# Altium footprint library IoT_SYNTHPATCH.PcbLib: 65 footprints (part 1 of 5)
Each footprint in its own frame and in the unit in brackets; x right, y up, seen from the top. Pads: shape width x height; smd on the part's side, far side on the other; paste and mask are expansions set on the pad; w line width, h text height; cw(c..) or ccw(c..) is an arc to the next point about the centre after c.
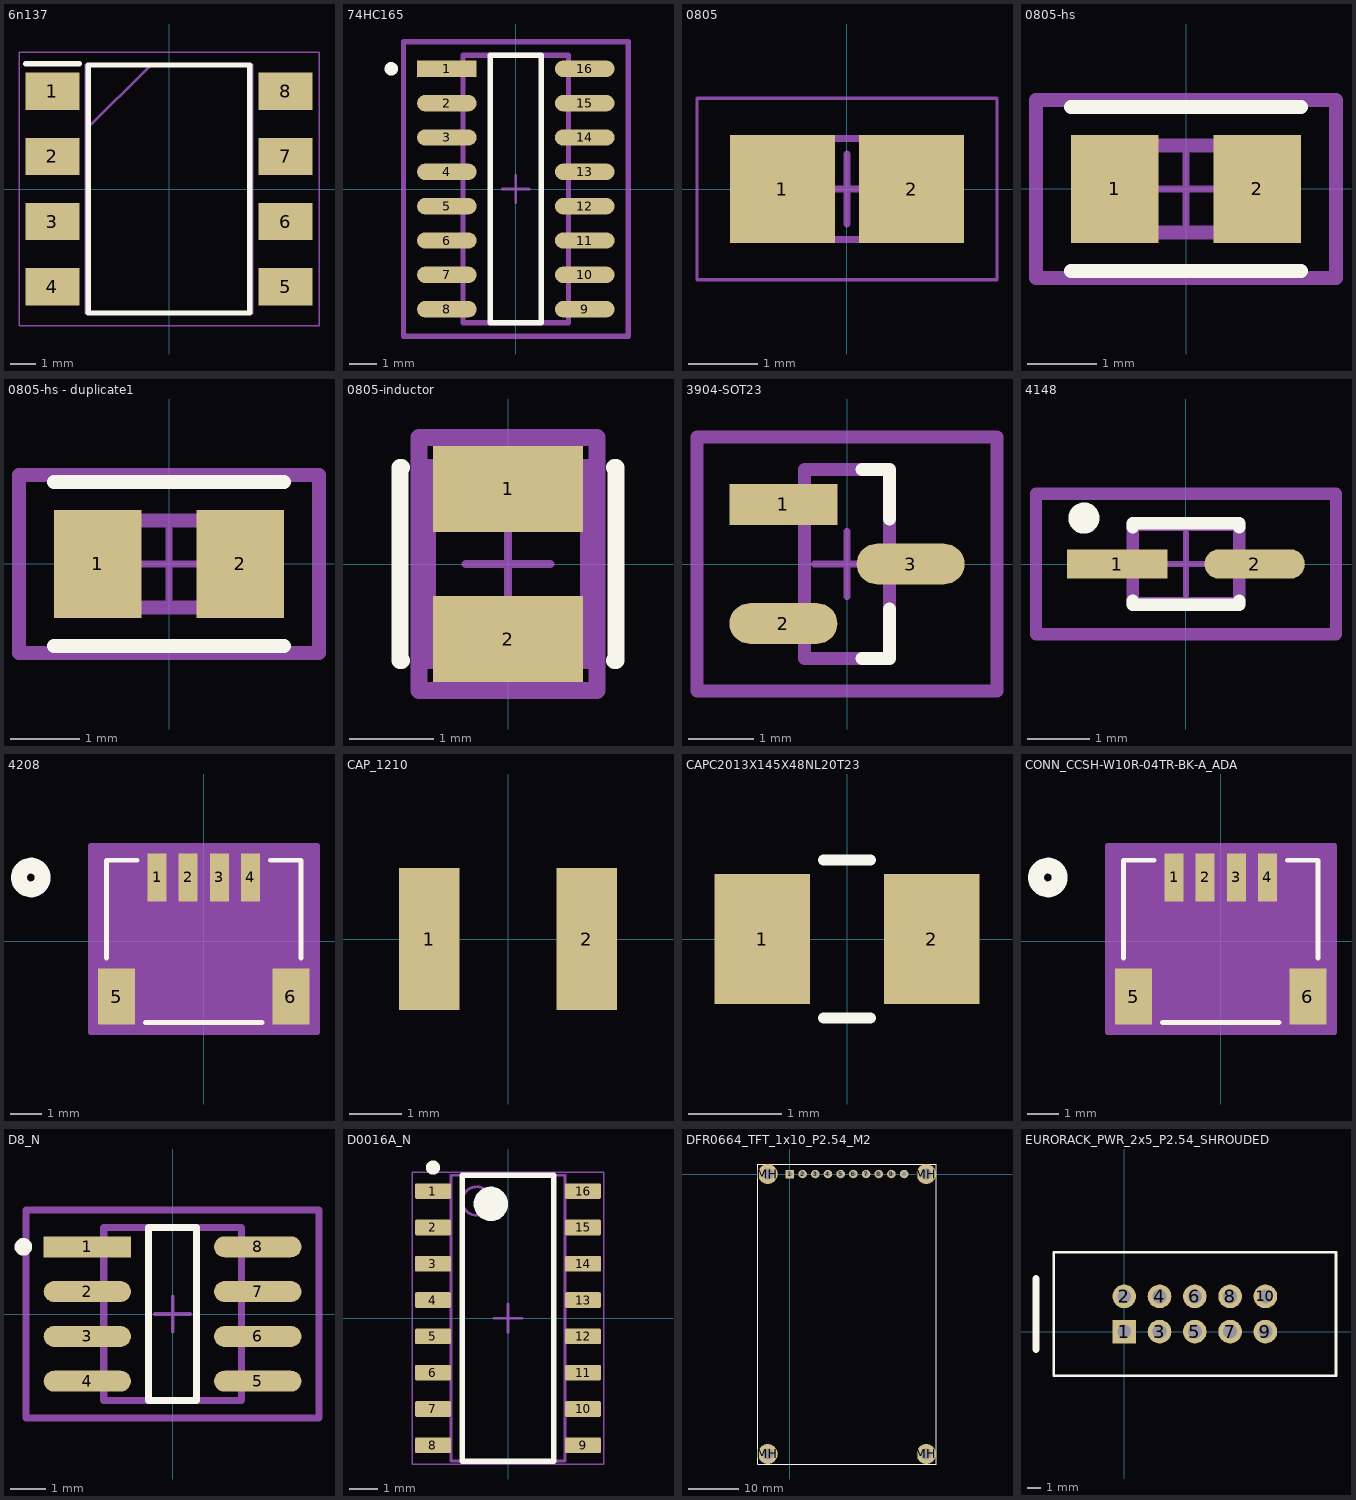
[diagram p0: the footprints below, top view; thin cyan lines are the x and y axes]

## 6n137 [mm]
pads (8):
  rect 2.1x1.45 smd: 1(-4.55,3.81) 2(-4.55,1.27) 3(-4.55,-1.27) 4(-4.55,-3.81) 5(4.55,-3.81) 6(4.55,-1.27) 7(4.55,1.27) 8(4.55,3.81)
Top Overlay:
  lines w0.2: -5.6,4.885 -3.5,4.885 ; -3.15,-4.84 -3.15,4.84 3.15,4.84 3.15,-4.84 -3.15,-4.84
Mechanical 15:
  lines w0.1: -3.25,2.3 -0.71,4.84 ; -3.25,-4.84 -3.25,4.84 3.25,4.84 3.25,-4.84 -3.25,-4.84
Bottom Assembly:
  lines w0.05: -5.85,-5.34 -5.85,5.34 5.85,5.34 5.85,-5.34 -5.85,-5.34

## 74HC165 [mm]
pads (16):
  rect 2.204x0.608 smd paste+0 mask+0: 1(-2.551,4.445)
  rrect100% 2.204x0.608 smd paste+0 mask+0: 2(-2.551,3.175) 3(-2.551,1.905) 4(-2.551,0.635) 5(-2.551,-0.635) 6(-2.551,-1.905) 7(-2.551,-3.175) 8(-2.551,-4.445) 9(2.551,-4.445) 10(2.551,-3.175) 11(2.551,-1.905) 12(2.551,-0.635) 13(2.551,0.635) 14(2.551,1.905) 15(2.551,3.175) 16(2.551,4.445)
Top Overlay:
  circle w0.25: c-4.603,4.445 r0.125
  lines w0.2: -0.949,-4.95 0.949,-4.95 0.949,4.95 -0.949,4.95 -0.949,-4.95
Top 3D Body:
  lines w0.2: -1.95,-4.95 1.95,-4.95 1.95,4.95 -1.95,4.95 -1.95,-4.95
Top Courtyard:
  lines w0.2: -4.153,-5.45 4.153,-5.45 4.153,5.45 -4.153,5.45 -4.153,-5.45
Top Assembly:
  lines w0.2: -4.153,-5.45 4.153,-5.45 4.153,5.45 -4.153,5.45 -4.153,-5.45
  text ".Designator" at 0,0.187 h1
Top Component Center:
  lines w0.1: -0.5,0 0.5,0 ; 0,-0.5 0,0.5
3D body "IC_Nexperia_74HC165D_653_eec.STEP": height 0.25, standoff 0, extent -4.153,-5.45 4.153,5.45

## 0805 [mm] "Chip Capacitor, 2-Leads, Body 2.00x1.25mm, IPC Low Density"
height 1.45
pads (2):
  rect 1.5x1.55 smd: 1(-0.925,0) 2(0.925,0)
Mechanical 13:
  lines w0.1: -1.1,-0.725 -1.1,0.725 1.1,0.725 1.1,-0.725 -1.1,-0.725
Mechanical 15:
  lines w0.05: -2.15,-1.3 -2.15,1.3 2.15,1.3 2.15,-1.3 -2.15,-1.3
  lines w0.1: -0.5,0 0.5,0 ; 0,-0.5 0,0.5
3D body: height 1.45, standoff 0, extent -0.62,-0.725 0.62,0.725
3D body: height 1.45, standoff 0, extent -1.1,-0.725 -0.62,0.725
3D body: height 1.45, standoff 0, extent 0.62,-0.725 1.1,0.725

## 0805-hs [mm]
pads (2):
  rect 1.255x1.556 smd paste+0 mask+0: 1(-1.025,0) 2(1.025,0)
Top Overlay:
  lines w0.2: -1.653,-1.178 1.653,-1.178 ; -1.653,1.178 1.653,1.178
Top 3D Body:
  lines w0.2: -1,-0.625 1,-0.625 1,0.625 -1,0.625 -1,-0.625
Top Courtyard:
  lines w0.2: -2.153,-1.278 2.153,-1.278 2.153,1.278 -2.153,1.278 -2.153,-1.278
Top Assembly:
  lines w0.2: -2.153,-1.278 2.153,-1.278 2.153,1.278 -2.153,1.278 -2.153,-1.278
  text ".Designator" at 0,0.187 h1
Top Component Center:
  lines w0.1: -0.5,0 0.5,0 ; 0,-0.5 0,0.5
3D body "Res_KOA_Speer_RN73R2ATTD3611C25_eec.STEP": height 0.25, standoff 0, extent -2.153,-1.278 2.153,1.278

## 0805-hs - duplicate1 [mm]
pads (2):
  rect 1.255x1.556 smd paste+0 mask+0: 1(-1.025,0) 2(1.025,0)
Top Overlay:
  lines w0.2: -1.653,-1.178 1.653,-1.178 ; -1.653,1.178 1.653,1.178
Top 3D Body:
  lines w0.2: -1,-0.625 -1,0.625 1,0.625 1,-0.625 -1,-0.625
Top Courtyard:
  lines w0.2: -2.153,-1.278 -2.153,1.278 2.153,1.278 2.153,-1.278 -2.153,-1.278
Top Assembly:
  lines w0.2: -2.153,-1.278 -2.153,1.278 2.153,1.278 2.153,-1.278 -2.153,-1.278
  text ".Designator" at 0,0.187 h1
Top Component Center:
  lines w0.1: -0.5,0 0.5,0 ; 0,-0.5 0,0.5
3D body "Res_KOA_Speer_RN73R2ATTD3611C25_eec.STEP": height 0.25, standoff 0, extent -2.153,-1.278 2.153,1.278

## 0805-inductor [mm]
pads (2):
  rect 1.78x1.02 smd paste+0 mask+0: 1(0,0.89) 2(0,-0.89)
Top Overlay:
  lines w0.2: -1.265,-1.145 -1.28,-1.145 -1.28,1.145 -1.265,1.145 ; 1.265,-1.145 1.28,-1.145 1.28,1.145 1.265,1.145
Top 3D Body:
  lines w0.2: -0.955,-1.145 0.955,-1.145 0.955,1.145 -0.955,1.145 -0.955,-1.145
Top Courtyard:
  lines w0.2: -1.055,-1.5 1.055,-1.5 1.055,1.5 -1.055,1.5 -1.055,-1.5
Top Assembly:
  lines w0.2: -1.055,-1.5 1.055,-1.5 1.055,1.5 -1.055,1.5 -1.055,-1.5
  text ".Designator" at 0,0.187 h1
Top Component Center:
  lines w0.1: -0.5,0 0.5,0 ; 0,-0.5 0,0.5
3D body "Ind_Coilcraft_0805LS-111XJLC_eec.STEP": height 0.25, standoff 0, extent -1.055,-1.5 1.055,1.5

## 3904-SOT23 [mm]
pads (3):
  rect 1.659x0.627 smd paste+0 mask+0: 1(-0.977,0.915)
  rrect100% 1.659x0.627 smd paste+0 mask+0: 2(-0.977,-0.915) 3(0.977,0)
Top Overlay:
  lines w0.2: 0.228,-1.45 0.65,-1.45 0.65,-0.688 ; 0.228,1.45 0.65,1.45 0.65,0.688
Top 3D Body:
  lines w0.2: -0.65,-1.45 -0.65,1.45 0.65,1.45 0.65,-1.45 -0.65,-1.45
Top Courtyard:
  lines w0.2: -2.306,-1.95 -2.306,1.95 2.306,1.95 2.306,-1.95 -2.306,-1.95
Top Assembly:
  lines w0.2: -2.306,-1.95 -2.306,1.95 2.306,1.95 2.306,-1.95 -2.306,-1.95
  text ".Designator" at 0,-0.001 h1
Top Component Center:
  lines w0.1: -0.5,0 0.5,0 ; 0,-0.5 0,0.5
3D body "Diode_Diodes_Inc_BZX84C18-7-F_eec.STEP": height 0.25, standoff 0, extent -2.306,-1.95 2.306,1.95

## 4148 [mm]
pads (2):
  rect 1.606x0.472 smd paste+0 mask+0: 1(-1.1,0)
  rrect100% 1.606x0.472 smd paste+0 mask+0: 2(1.1,0)
Top Overlay:
  circle w0.25: c-1.635,0.736 r0.125
  lines w0.2: -0.85,-0.585 -0.85,-0.65 0.85,-0.65 0.85,-0.585 ; -0.85,0.585 -0.85,0.65 0.85,0.65 0.85,0.585
Top 3D Body:
  lines w0.2: -0.85,-0.625 -0.85,0.625 0.85,0.625 0.85,-0.625 -0.85,-0.625
Top Courtyard:
  lines w0.2: -2.403,-1.125 -2.403,1.125 2.403,1.125 2.403,-1.125 -2.403,-1.125
Top Assembly:
  lines w0.2: -2.403,-1.125 -2.403,1.125 2.403,1.125 2.403,-1.125 -2.403,-1.125
  text ".Designator" at 0,0.187 h1
Top Component Center:
  lines w0.1: -0.5,0 0.5,0 ; 0,-0.5 0,0.5
3D body "Diode_ON_Semiconductor_1N4148WS_eec.STEP": height 0.25, standoff 0, extent -2.403,-1.125 2.403,1.125

## 4208 [mil]
pads (6):
  rect 24x61 smd paste+0 mask+0: 1(-59.06,80.77) 2(-19.68,80.77) 3(19.68,80.77) 4(59.06,80.77)
  rect 47x71 smd paste+0 mask+0: 5(-110.24,-69.82) 6(110.24,-69.82)
Top Overlay:
  circle w20: c-218.74,80.77 r15
  lines w6: -123,-21.22 -123,102.5 -84.16,102.5 ; -73.64,-102.5 73.64,-102.5 ; 84.16,102.5 123,102.5 123,-21.22
  text ".Designator" at -137.5,55.77 h50
Bottom Overlay:
  circle w20: c-218.74,80.77 r15
Mechanical 13:
  circle w20: c-59.06,80.77 r15
  lines w1: -118,-97.5 -118,97.5 118,97.5 118,-97.5 -118,-97.5
  text ".Designator" at -137.5,55.77 h50
Mechanical 15:
  region: 143.74,121.27 -143.74,121.27 -143.74,-115.32 143.74,-115.32
  lines w6: -143.74,-115.32 143.74,-115.32 143.74,121.27 -143.74,121.27 -143.74,-115.32

## CAP_1210 [mm] "1210 (3225 metric) capacitor, pads 1.15x2.7 mm at +/-1.5 mm"
pads (2):
  rect 1.15x2.7 smd: 1(-1.5,0) 2(1.5,0)

## CAPC2013X145X48NL20T23 [mm] "0805 (2012 metric)"
pads (2):
  rect 1.025x1.4 smd paste+0 mask+0: 1(-0.913,0) 2(0.913,0)
Top Overlay:
  lines w0.12: -0.25,-0.85 0.25,-0.85 ; -0.25,0.85 0.25,0.85

## CONN_CCSH-W10R-04TR-BK-A_ADA [mil]
pads (6):
  rect 24x61 smd paste+0 mask+0: 1(-59.06,80.77) 2(-19.68,80.77) 3(19.68,80.77) 4(59.06,80.77)
  rect 47x71 smd paste+0 mask+0: 5(-110.24,-69.82) 6(110.24,-69.82)
Top Overlay:
  circle w20: c-218.74,80.77 r15
  lines w6: -123,-21.22 -123,102.5 -84.16,102.5 ; -73.64,-102.5 73.64,-102.5 ; 84.16,102.5 123,102.5 123,-21.22
  text ".Designator" at -137.5,55.77 h50
Bottom Overlay:
  circle w20: c-218.74,80.77 r15
Mechanical 13:
  circle w20: c-59.06,80.77 r15
  lines w1: -118,-97.5 -118,97.5 118,97.5 118,-97.5 -118,-97.5
  text ".Designator" at -137.5,55.77 h50
Mechanical 15:
  region: 143.74,121.27 -143.74,121.27 -143.74,-115.32 143.74,-115.32
  lines w6: -143.74,-115.32 143.74,-115.32 143.74,121.27 -143.74,121.27 -143.74,-115.32

## D8_N [mm]
pads (8):
  rect 2.474x0.592 smd paste+0 mask+0: 1(-2.416,1.905)
  rrect100% 2.474x0.592 smd paste+0 mask+0: 2(-2.416,0.635) 3(-2.416,-0.635) 4(-2.416,-1.905) 5(2.416,-1.905) 6(2.416,-0.635) 7(2.416,0.635) 8(2.416,1.905)
Top Overlay:
  circle w0.25: c-4.228,1.905 r0.125
  lines w0.2: -0.679,-2.45 -0.679,2.45 0.679,2.45 0.679,-2.45 -0.679,-2.45
Top 3D Body:
  lines w0.2: -1.95,-2.45 -1.95,2.45 1.95,2.45 1.95,-2.45 -1.95,-2.45
Top Courtyard:
  lines w0.2: -4.153,-2.95 -4.153,2.95 4.153,2.95 4.153,-2.95 -4.153,-2.95
Top Assembly:
  lines w0.2: -4.153,-2.95 -4.153,2.95 4.153,2.95 4.153,-2.95 -4.153,-2.95
  text ".Designator" at 0,0.187 h1
Top Component Center:
  lines w0.1: -0.5,0 0.5,0 ; 0,-0.5 0,0.5
3D body "IC_STMicroelectronics_M41T00M6F_eec.STEP": height 0.25, standoff 0, extent -4.153,-2.95 4.153,2.95

## D0016A_N [mm] "SOIC, 16-Leads, Body 10x4mm, Pitch 1.27mm, IPC High Density"
height 1.75
pads (16):
  rrect18% 1.25x0.55 smd: 1(-2.625,4.445) 2(-2.625,3.175) 3(-2.625,1.905) 4(-2.625,0.635) 5(-2.625,-0.635) 6(-2.625,-1.905) 7(-2.625,-3.175) 8(-2.625,-4.445) 9(2.625,-4.445) 10(2.625,-3.175) 11(2.625,-1.905) 12(2.625,-0.635) 13(2.625,0.635) 14(2.625,1.905) 15(2.625,3.175) 16(2.625,4.445)
Top Overlay:
  circle w0.6: c-0.6,4 r0.3
  circle w0.25: c-2.625,5.27 r0.125
  lines w0.2: -1.6,-5 1.6,-5 1.6,5 -1.6,5 -1.6,-5
Mechanical 1:
  text ".Designator" at -1.531,-0.319 h0.8
Mechanical 13:
  circle w0.1: c-1.1,4.1 r0.5
  lines w0.1: -2,-5 2,-5 2,5 -2,5 -2,-5
Mechanical 15:
  lines w0.05: -3.35,-5.1 3.35,-5.1 3.35,5.1 -3.35,5.1 -3.35,-5.1
  lines w0.1: -0.5,0 0.5,0 ; 0,-0.5 0,0.5
3D body "SOIC-16akaD0016AakaM16A.stp": height 1.59, standoff -0.01, extent -2.997,-4.953 2.997,4.953

## DFR0664_TFT_1x10_P2.54_M2 [mm] "DFRobot DFR0664 2.0in TFT: 1x10 header 2.54mm (pin1=VCC), 4x M2 holes 31.7x56mm, board 35.7x60mm. Verify against module before ordering."
pads (14):
  rect 1.7x1.7 hole 1: 1(0,0)
  round 1.7 hole 1: 2(2.54,0) 3(5.08,0) 4(7.62,0) 5(10.16,0) 6(12.7,0) 7(15.24,0) 8(17.78,0) 9(20.32,0) 10(22.86,0)
  round 4 hole 2.2: MH(-4.42,-56) MH(-4.42,0) MH(27.28,-56) MH(27.28,0)
Top Overlay:
  lines w0.2: -6.42,-58 29.28,-58 29.28,2 -6.42,2 -6.42,-58
3D body "DFR0664.STEP": height 14, standoff 8.5, extent -6.25,-57.305 29.45,2.695

## EURORACK_PWR_2x5_P2.54_SHROUDED [mm] "Eurorack power header 2x5 2.54mm shrouded, pin1 = -12V (red stripe)"
pads (10):
  rect 1.7x1.7 hole 1: 1(0,0)
  round 1.7 hole 1: 2(0,2.54) 3(2.54,0) 4(2.54,2.54) 5(5.08,0) 6(5.08,2.54) 7(7.62,0) 8(7.62,2.54) 9(10.16,0) 10(10.16,2.54)
Top Overlay:
  lines w0.2: -5.08,-3.18 15.24,-3.18 15.24,5.72 -5.08,5.72 -5.08,-3.18
  lines w0.5: -6.35,-1.27 -6.35,3.81